# Altium footprint library FootPrintLib_8.PcbLib: 590 footprints (part 6 of 37)
Each footprint in its own frame and in the unit in brackets; x right, y up, seen from the top. Pads: shape width x height; smd on the part's side, far side on the other; paste and mask are expansions set on the pad; w line width, h text height; cw(c..) or ccw(c..) is an arc to the next point about the centre after c.
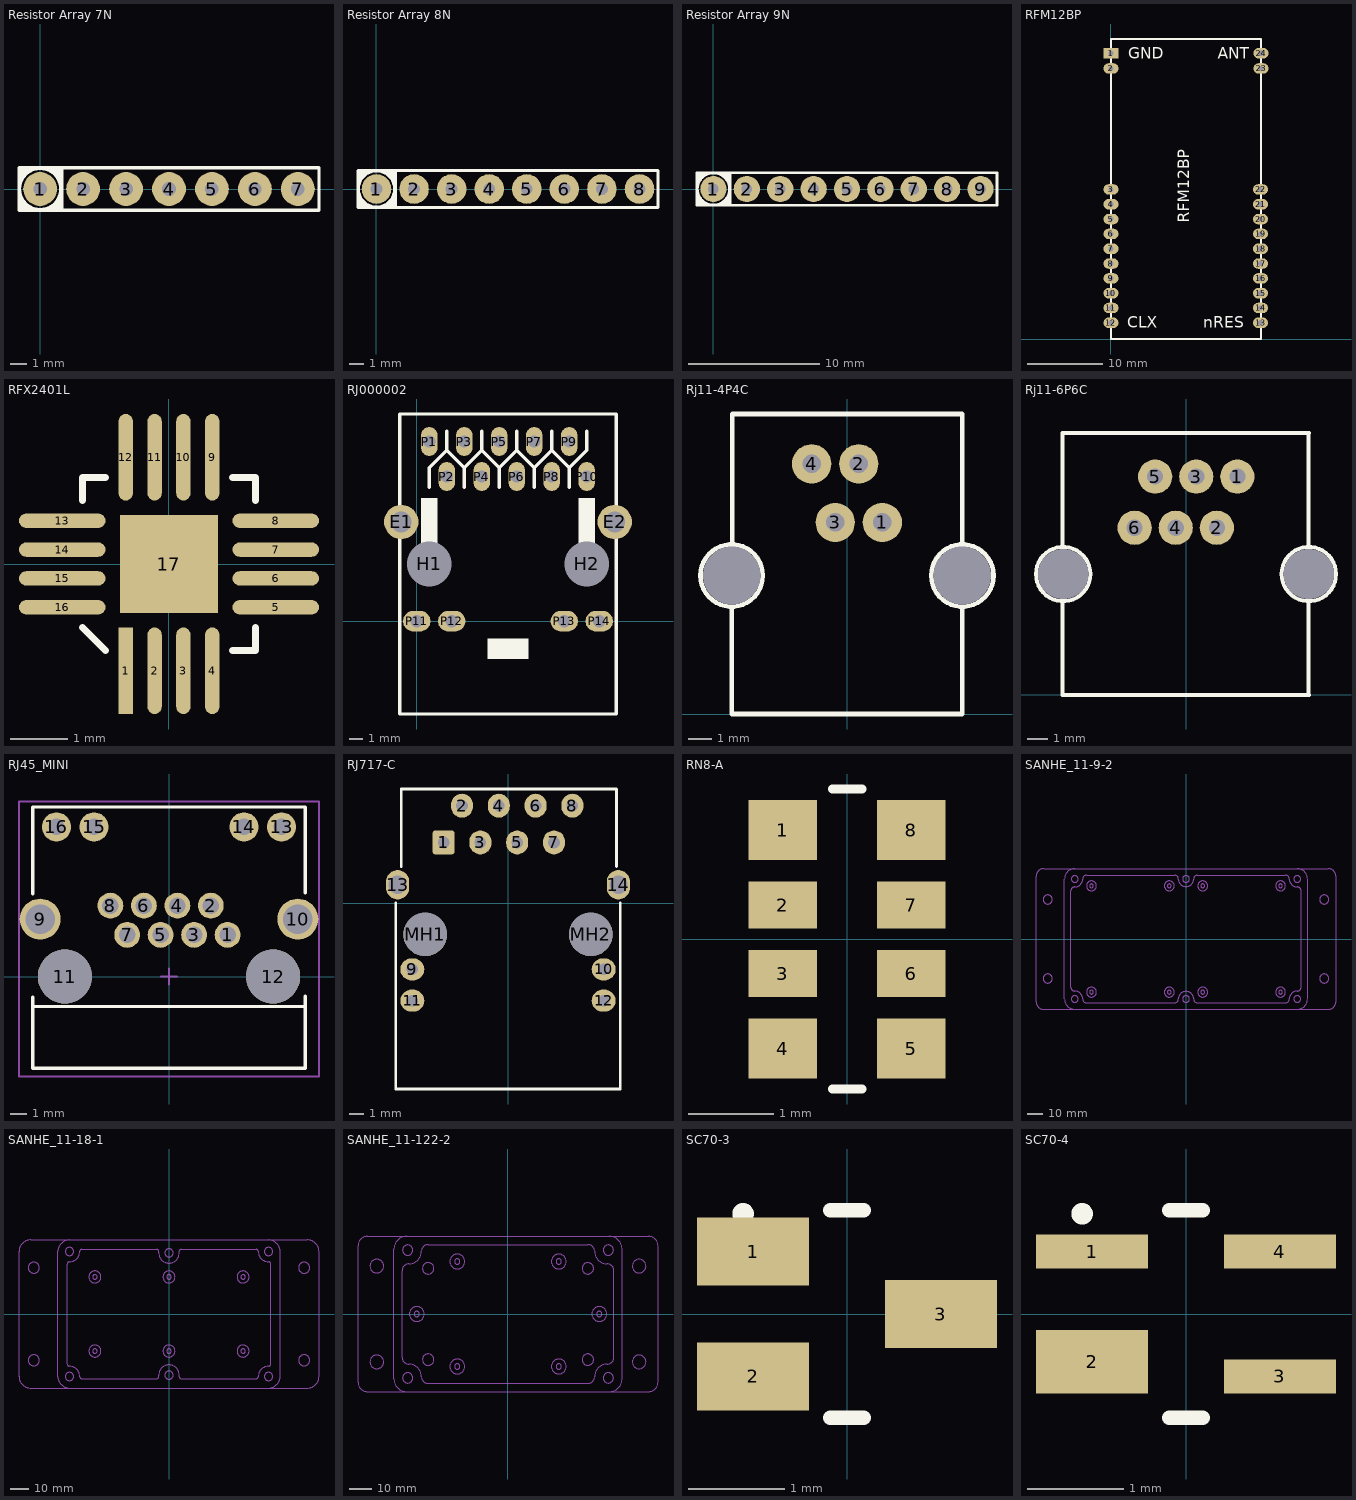
[diagram p5: the footprints below, top view; thin cyan lines are the x and y axes]

## Resistor Array 7N [mm] "Resistor Networks, P2.54mm"
height 5.2
pads (7):
  round 2 hole 0.8: 1(0,0) 2(2.54,0) 3(5.08,0) 4(7.62,0) 5(10.16,0) 6(12.7,0) 7(15.24,0)
Top Overlay:
  circle w0.2: c0,0 r1.221
  region: 1.27,1.25 1.27,0.35 0.37,1.25
  region: 1.27,-1.25 0.37,-1.25 1.27,-0.35
  region: -1.25,-1.25 -1.25,-0.35 -0.35,-1.25
  region: -1.25,1.25 -0.35,1.25 -1.25,0.35
  lines w0.2: 1.27,-1.25 1.27,1.25 ; -1.25,-1.25 16.49,-1.25 16.49,1.25 -1.25,1.25 -1.25,-1.25
3D body "ResArray 7N.step": height 5.63, standoff -2.95, extent -1.27,-1.261 16.51,1.25

## Resistor Array 8N [mm] "Resistor Networks, P2.54mm"
height 5.2
pads (8):
  round 2 hole 0.8: 1(0,0) 2(2.54,0) 3(5.08,0) 4(7.62,0) 5(10.16,0) 6(12.7,0) 7(15.24,0) 8(17.78,0)
Top Overlay:
  circle w0.2: c0,0 r1.221
  region: 1.27,1.25 1.27,0.35 0.37,1.25
  region: 1.27,-1.25 0.37,-1.25 1.27,-0.35
  region: -1.25,-1.25 -1.25,-0.35 -0.35,-1.25
  region: -1.25,1.25 -0.35,1.25 -1.25,0.35
  lines w0.2: 1.27,-1.25 1.27,1.25 ; -1.25,-1.25 19.03,-1.25 19.03,1.25 -1.25,1.25 -1.25,-1.25
3D body "ResArray 8N.step": height 5.63, standoff -2.95, extent -1.27,-1.261 19.05,1.25

## Resistor Array 9N [mm] "Resistor Networks, P2.54mm"
height 5.2
pads (9):
  round 2 hole 0.8: 1(0,0) 2(2.54,0) 3(5.08,0) 4(7.62,0) 5(10.16,0) 6(12.7,0) 7(15.24,0) 8(17.78,0) 9(20.32,0)
Top Overlay:
  circle w0.2: c0,0 r1.221
  region: 1.27,1.25 1.27,0.35 0.37,1.25
  region: 1.27,-1.25 0.37,-1.25 1.27,-0.35
  region: -1.25,-1.25 -1.25,-0.35 -0.35,-1.25
  region: -1.25,1.25 -0.35,1.25 -1.25,0.35
  lines w0.2: 1.27,-1.25 1.27,1.25 ; -1.25,-1.25 21.57,-1.25 21.57,1.25 -1.25,1.25 -1.25,-1.25
3D body "ResArray 9N.step": height 5.63, standoff -2.95, extent -1.27,-1.261 21.59,1.25

## RFM12BP [mm]
pads (24):
  rect 2x1.4 hole 0.7: 1(0,38.1)
  oval 2x1.4 hole 0.7: 2(0,36.068) 3(0,19.939) 4(0,17.963) 5(0,15.988) 6(0,14.012) 7(0,12.037) 8(0,10.061) 9(0,8.086) 10(0,6.11) 11(0,4.135) 12(0,2.159) 13(19.939,2.159) 14(19.939,4.135) 15(19.939,6.11) 16(19.939,8.086) 17(19.939,10.061) 18(19.939,12.037) 19(19.939,14.012) 20(19.939,15.988) 21(19.939,17.963) 22(19.939,19.939) 23(20,36.068) 24(20,38.1)
Top Overlay:
  lines w0.254: 0,0 0,40 20,40 20,0 0,0
  text "CLX" at 2.159,1.524 h1.52
  text "nRES" at 12.319,1.524 h1.52
  text "ANT" at 14.224,37.338 h1.52
  text "GND" at 2.286,37.338 h1.52
  text "RFM12BP" at 10.414,15.494 h1.52

## RFX2401L [mm]
pads (17):
  rect 0.25x1.5 smd: 1(-0.75,-1.85)
  oval 0.25x1.5 smd: 2(-0.25,-1.85) 3(0.25,-1.85) 4(0.75,-1.85) 9(0.75,1.85) 10(0.25,1.85) 11(-0.25,1.85) 12(-0.75,1.85)
  oval 1.5x0.25 smd: 5(1.85,-0.75) 6(1.85,-0.25) 7(1.85,0.25) 8(1.85,0.75) 13(-1.85,0.75) 14(-1.85,0.25) 15(-1.85,-0.25) 16(-1.85,-0.75)
  rect 1.7x1.7 smd: 17(0,0)
Top Overlay:
  lines w0.127: -1.5,-1.1 -1.1,-1.5 ; -1.5,1.1 -1.5,1.5 -1.1,1.5 ; 1.1,-1.5 1.5,-1.5 1.5,-1.1 ; 1.1,1.5 1.5,1.5 1.5,1.1

## RJ000002 [mm] "RJ-45"
height 13.35
pads (18):
  round 2.5 hole 1.5: E1(-1.125,7.2) E2(14.375,7.2)
  round 3 hole 3.25 unplated: H1(0.91,4.15) H2(12.34,4.15)
  oval 1.2x2.1 / inner oval 1.8x2.1 / far side oval 1.8x2.1 hole 0.9: P1(0.91,13.04) P2(2.18,10.5) P3(3.45,13.04) P4(4.72,10.5) P5(5.99,13.04) P6(7.26,10.5) P7(8.53,13.04) P8(9.8,10.5) P9(11.07,13.04) P10(12.34,10.5)
  oval 2x1.5 hole 0.9: P11(0,0) P12(2.54,0) P13(10.71,0) P14(13.25,0)
Top Overlay:
  rectangle: 0.31,4.15 1.51,8.94
  rectangle: 5.125,-2.75 8.125,-1.25
  rectangle: 11.74,4.15 12.94,8.94
  lines w0.254: 0.91,9.738 0.91,11.135 2.18,12.405 ; 2.18,13.802 2.18,12.405 ; 3.45,9.738 3.45,11.135 ; 4.72,13.802 4.72,12.405 ; 5.99,9.738 5.99,11.135 ; 7.26,13.802 7.26,12.405 ; 8.53,9.738 8.53,11.135 ; 9.8,13.802 9.8,12.405 ; 11.07,9.738 11.07,11.135 ; 12.34,13.802 12.34,12.405 11.07,11.135 ; 2.18,12.405 3.45,11.135 ; 3.45,11.135 4.72,12.405 ; 4.72,12.405 5.99,11.135 ; 5.99,11.135 7.26,12.405 ; 7.26,12.405 8.53,11.135 ; 8.53,11.135 9.8,12.405 ; 9.8,12.405 11.07,11.135 ; -1.25,-6.74 -1.25,15.04 14.5,15.04 14.5,-6.74 -1.25,-6.74
Bottom Overlay:
  lines w0.254: 0.91,9.738 0.91,11.135 2.18,12.405 ; 2.18,13.802 2.18,12.405 ; 3.45,9.738 3.45,11.135 ; 4.72,13.802 4.72,12.405 ; 5.99,9.738 5.99,11.135 ; 7.26,13.802 7.26,12.405 ; 8.53,9.738 8.53,11.135 ; 9.8,13.802 9.8,12.405 ; 11.07,9.738 11.07,11.135 ; 12.34,13.802 12.34,12.405 11.07,11.135 ; 2.18,12.405 3.45,11.135 ; 3.45,11.135 4.72,12.405 ; 4.72,12.405 5.99,11.135 ; 5.99,11.135 7.26,12.405 ; 7.26,12.405 8.53,11.135 ; 8.53,11.135 9.8,12.405 ; 9.8,12.405 11.07,11.135
3D body "SW3dPS-bothhandusalu1t516-43-lf.STEP": height 13.02, standoff -4.01, extent -0.995,-6.5 14.245,14.8

## Rj11-4P4C [mm] "Body 13 x 10mm,Pitch 2.04mm"
height 14.5
pads (6):
  round 1.7 hole 0.8: 1(1.53,8.3) 2(0.51,10.84) 3(-0.51,8.3) 4(-1.53,10.84)
  round 0 hole 2.5: 5(-5,6) 6(5,6)
Top Overlay:
  circle w0.2: c-5,6 r1.35
  circle w0.2: c5,6 r1.35
  lines w0.2: -5,4.625 -5,0 5,0 5,4.625 ; -4.97,7.375 -4.97,13 5,13 5,7.375
3D body "71070909.stp": height 14.55, standoff -3.4, extent -6.231,0 6.231,13

## Rj11-6P6C [mm] "Body 13 x 12.2mm,Pitch 2.04mm"
height 14.5
pads (8):
  round 1.7 hole 0.8: 1(2.55,10.84) 2(1.53,8.3) 3(0.51,10.84) 4(-0.51,8.3) 5(-1.53,10.84) 6(-2.55,8.3)
  round 0 hole 2.5: 7(-6.1,6) 8(6.1,6)
Top Overlay:
  circle w0.2: c6.1,6 r1.35
  circle w0.2: c-6.1,6 r1.35
  lines w0.2: -6.145,0 -6.145,4.625 ; -6.145,7.375 -6.145,13 ; -6.1,0 6.1,0 ; -6.1,13 6.1,13 6.095,13 6.095,7.375 ; 6.095,0 6.095,4.625
3D body "MJ3205-66-0-5-P.stp": height 14.52, standoff -3.38, extent -7.2,0 7.2,13

## RJ45_MINI [mm] "RJ45 MiniWith LED"
height 13.1
pads (16):
  round 1.575 hole 1: 1(3.57,2.54) 2(2.55,4.32) 3(1.53,2.54) 4(0.51,4.32) 5(-0.51,2.54) 6(-1.53,4.32) 7(-2.55,2.54) 8(-3.57,4.32)
  round 2.5 hole 1.8: 9(-7.85,3.5) 10(7.85,3.5)
  round 3.3 hole 3.3 unplated: 11(-6.35,0) 12(6.35,0)
  round 1.778 hole 1: 13(6.86,9.12) 14(4.57,9.12) 15(-4.57,9.12) 16(-6.86,9.12)
Top Overlay:
  lines w0.203: -8.3,-1.829 8.3,-1.829 ; -8.3,-1.265 -8.3,-5.588 8.3,-5.588 8.3,-1.214 ; -8.3,5.034 -8.3,10.338 8.3,10.338 8.3,5.085
Mechanical 15:
  lines w0.1: -0.5,0 0.5,0 ; 0,-0.5 0,0.5 ; -9.144,-6.096 -9.144,10.668 9.144,10.668 9.144,-6.096 -9.144,-6.096
3D body "User Library-RJ45-9803-LED.step": height 14.75, standoff -3.68, extent -8.355,-5.986 8.355,10.264

## RJ717-C [mil]
pads (16):
  rrect25% 60x65 hole 31.5: 1(-175,164.98)
  oval 60x65 hole 31.5: 2(-125,264.98) 3(-75,164.98) 4(-25,264.98) 5(25,164.98) 6(75,264.98) 7(125,164.98) 8(175,264.98)
  oval 65x60 hole 31.5: 9(-260,-179.98) 10(260,-179.98) 11(-260,-264.98) 12(260,-264.98)
  oval 62.99x80 hole 49.21: 13(-300,50) 14(300,50)
  round 118.11 hole 118.11 unplated: MH1(-225,-85.02) MH2(225,-85.02)
Top Overlay:
  lines w7.87: -305,0 -305,-505 305,-505 305,0 ; -290,100 -290,310.26 295,310.26 295,100

## RN8-A [mil] "Resistor Array"
pads (8):
  rect 31.5x27.56 smd: 1(-29.55,50.2) 4(-29.55,-50.2) 5(29.55,-50.2) 8(29.55,50.2)
  rect 31.47x21.67 smd: 2(-29.55,15.8) 3(-29.55,-15.7) 6(29.5,-15.7) 7(29.5,15.8)
Top Overlay:
  lines w4: -6.75,-68.7 7.05,-68.7 ; -6.75,69.1 7.05,69.1
3D body "SW3dPS-RN164P.STEP": height 21.65, standoff 0, extent -30.69,-63.07 32.31,62.91

## SANHE_11-9-2 [mm] "Water Proof Enclosure"
height 60
Mechanical 5:
  circle w0.254: c0,39.5 r2.25
  circle w0.254: c-91,26 r3
  circle w0.254: c-91,-26 r3
  circle w0.254: c91,-26 r3
  circle w0.254: c91,26 r3
  circle w0.254: c-11,-35 r1.25
  circle w0.254: c-11,-35 r3.25
  circle w0.254: c11,-35 r1.25
  circle w0.254: c11,-35 r3.25
  circle w0.254: c-11,35 r3.25
  circle w0.254: c-11,35 r1.25
  circle w0.254: c73.25,-39.5 r2.25
  circle w0.254: c73.25,39.5 r2.25
  circle w0.254: c11,35 r3.25
  circle w0.254: c11,35 r1.25
  circle w0.254: c-62.25,35 r1.25
  circle w0.254: c-62.25,35 r3.25
  circle w0.254: c-73.25,39.5 r2.25
  circle w0.254: c-73.25,-39.5 r2.25
  circle w0.254: c-62.25,-35 r3.25
  circle w0.254: c-62.25,-35 r1.25
  circle w0.254: c0,-39.5 r2.25
  circle w0.254: c62.25,-35 r1.25
  circle w0.254: c62.25,-35 r3.25
  circle w0.254: c62.25,35 r3.25
  circle w0.254: c62.25,35 r1.25
  lines w0.254: -73.25,-46.25 cw(c-73.25,-39.5) -80,-39.5 -80,39.5 cw(c-73.25,39.5) -73.25,46.25 ; -73.25,-46.25 -93.75,-46.25 cw(c-93.75,-41.25) -98.75,-41.25 -98.75,41.25 cw(c-93.75,41.25) -93.75,46.25 -73.25,46.25 ; -73.25,-46.25 73.25,-46.25 ; -73.25,46.25 73.25,46.25 ; 73.25,-46.25 ccw(c73.25,-39.5) 80,-39.5 80,39.5 ccw(c73.25,39.5) 73.25,46.25 ; 73.25,-46.25 93.75,-46.25 ccw(c93.75,-41.25) 98.75,-41.25 98.75,41.25 ccw(c93.75,41.25) 93.75,46.25 73.25,46.25 ; -75.75,-31.75 ccw(c-73.25,-31.75) -73.25,-34.25 cw(c-73.25,-39.5) -68,-39.5 ccw(c-65.5,-39.5) -65.5,-42 -7.5,-42 ccw(c-7.5,-39.5) -5,-39.5 cw(c0,-39.5) 5,-39.5 ccw(c7.5,-39.5) 7.5,-42 65.5,-42 ccw(c65.5,-39.5) 68,-39.5 cw(c73.25,-39.5) 73.25,-34.25 ccw(c73.25,-31.75) 75.75,-31.75 75.75,31.75 ccw(c73.25,31.75) 73.25,34.25 cw(c73.25,39.5) 68,39.5 ccw(c65.5,39.5) 65.5,42 7.5,42 ccw(c7.5,39.5) 5,39.5 cw(c0,39.5) -5,39.5 ccw(c-7.5,39.5) -7.5,42 -65.5,42 ccw(c-65.5,39.5) -68,39.5 cw(c-73.25,39.5) -73.25,34.25 ccw(c-73.25,31.75) -75.75,31.75 -75.75,-31.75
  text "11-9-2" at -5.359,-29.464 h2

## SANHE_11-18-1 [mm] "Water Proof Enclosure"
height 64.5
Mechanical 5:
  circle w0.254: c0,-33 r2.25
  circle w0.254: c-40,-20 r1.2
  circle w0.254: c-40,-20 r3.25
  circle w0.254: c-53.75,-33.75 r2.25
  circle w0.254: c-53.75,33.75 r2.25
  circle w0.254: c-40,20 r3.25
  circle w0.254: c-40,20 r1.2
  circle w0.254: c40,20 r1.2
  circle w0.254: c40,20 r3.25
  circle w0.254: c53.75,33.75 r2.25
  circle w0.254: c53.75,-33.75 r2.25
  circle w0.254: c0,20 r1.2
  circle w0.254: c0,20 r3.25
  circle w0.254: c40,-20 r3.25
  circle w0.254: c40,-20 r1.2
  circle w0.254: c0,-20 r3.25
  circle w0.254: c0,-20 r1.2
  circle w0.254: c73,25 r3
  circle w0.254: c73,-25 r3
  circle w0.254: c-73,-25 r3
  circle w0.254: c-73,25 r3
  circle w0.254: c0,33 r2.25
  lines w0.254: -53.75,-40 cw(c-53.75,-33.75) -60,-33.75 -60,33.75 cw(c-53.75,33.75) -53.75,40 ; 53.75,-40 ccw(c53.75,-33.75) 60,-33.75 60,33.75 ccw(c53.75,33.75) 53.75,40 ; -81,-33.75 ccw(c-74.75,-33.75) -74.75,-40 74.75,-40 ccw(c74.75,-33.75) 81,-33.75 81,33.75 ccw(c74.75,33.75) 74.75,40 -74.75,40 ccw(c-74.75,33.75) -81,33.75 -81,-33.75 ; -55,-27 ccw(c-53.75,-27) -53.75,-28.25 cw(c-53.75,-33.75) -48.25,-33.75 ccw(c-47,-33.75) -47,-35 -6.75,-35 ccw(c-6.75,-33.75) -5.5,-33.75 -5.5,-33 cw(c0,-33) 5.5,-33 5.5,-33.75 ccw(c6.75,-33.75) 6.75,-35 47,-35 ccw(c47,-33.75) 48.25,-33.75 cw(c53.75,-33.75) 53.75,-28.25 ccw(c53.75,-27) 55,-27 55,27 ccw(c53.75,27) 53.75,28.25 cw(c53.75,33.75) 48.25,33.75 ccw(c47,33.75) 47,35 6.75,35 ccw(c6.75,33.75) 5.5,33.75 5.5,33 cw(c0,33) -5.5,33 -5.5,33.75 ccw(c-6.75,33.75) -6.75,35 -47,35 ccw(c-47,33.75) -48.25,33.75 cw(c-53.75,33.75) -53.75,28.25 ccw(c-53.75,27) -55,27 -55,-27
  text "11-122-2" at -6.68,-13.894 h2

## SANHE_11-122-2 [mm] "Water Proof Enclosure"
height 48.5
Mechanical 5:
  circle w0.254: c-35,-20 r2.5
  circle w0.254: c-22.25,-23 r1.2
  circle w0.254: c-22.25,-23 r3.25
  circle w0.254: c-44,-28 r2.25
  circle w0.254: c-44,28 r2.25
  circle w0.254: c-22.25,23 r3.25
  circle w0.254: c-22.25,23 r1.2
  circle w0.254: c-35,20 r2.5
  circle w0.254: c35,20 r2.5
  circle w0.254: c22.25,23 r1.2
  circle w0.254: c22.25,23 r3.25
  circle w0.254: c44,28 r2.25
  circle w0.254: c44,-28 r2.25
  circle w0.254: c40,0 r1.2
  circle w0.254: c40,0 r3.25
  circle w0.254: c22.25,-23 r3.25
  circle w0.254: c22.25,-23 r1.2
  circle w0.254: c35,-20 r2.5
  circle w0.254: c-40,0 r3.25
  circle w0.254: c-40,0 r1.2
  circle w0.254: c57.5,21 r3
  circle w0.254: c57.5,-21 r3
  circle w0.254: c-57.5,-21 r3
  circle w0.254: c-57.5,21 r3
  lines w0.254: -65.75,-30 ccw(c-61.75,-30) -61.75,-34 61.75,-34 ccw(c61.75,-30) 65.75,-30 65.75,30 ccw(c61.75,30) 61.75,34 -61.75,34 ccw(c-61.75,30) -65.75,30 -65.75,-30 ; -50,-28.43 ccw(c-44.43,-28.43) -44.43,-34 44.43,-34 ccw(c44.43,-28.43) 50,-28.43 50,28.43 ccw(c44.43,28.43) 44.43,34 -44.43,34 ccw(c-44.43,28.43) -50,28.43 -50,-28.43 ; -46.435,-19.005 ccw(c-43.505,-19.005) -43.505,-21.935 cw(c-43.505,-27.505) -37.935,-27.505 ccw(c-35.005,-27.505) -35.005,-30.435 35.005,-30.435 ccw(c35.005,-27.505) 37.935,-27.505 cw(c43.505,-27.505) 43.505,-21.935 ccw(c43.505,-19.005) 46.435,-19.005 46.435,19.005 ccw(c43.505,19.005) 43.505,21.935 cw(c43.505,27.505) 37.935,27.505 ccw(c35.005,27.505) 35.005,30.435 -35.005,30.435 ccw(c-35.005,27.505) -37.935,27.505 cw(c-43.505,27.505) -43.505,21.935 ccw(c-43.505,19.005) -46.435,19.005 -46.435,-19.005
  text "11-122-2" at -6.858,-27.432 h2

## SC70-3 [mil] "SC70/SOT-323 (DCK) Package. 3-Lead Plastic SC70."
height 39.37
pads (3):
  rect 46x28 smd: 1(-38.5,25.59) 2(-38.5,-25.59) 3(38.5,0)
Top Overlay:
  circle w6: c-42.59,41.09 r1.41
  lines w6: -6.93,-42.5 6.93,-42.5 ; -6.93,42.5 6.93,42.5
3D body "User Library-SC70-3.step": height 39.37, standoff 0, extent -45.27,-41.35 45.29,41.33

## SC70-4 [mil] "SC70/SOT-323 (DCK) Package. 4-Lead Plastic SC70."
height 39.37
pads (4):
  rect 46x14 smd: 1(-38.5,25.59) 3(38.5,-25.59) 4(38.5,25.59)
  rect 46x26 smd: 2(-38.5,-19.59)
Top Overlay:
  circle w6: c-42.59,41.09 r1.41
  lines w6: -6.93,-42.5 6.93,-42.5 ; -6.93,42.5 6.93,42.5
3D body "User Library-SC70-4.step": height 42.98, standoff -0.32, extent -43.3,-39.38 43.31,39.36